# Altium schematic symbol library AS150UPW_2+4_M_G_Y.SchLib: 1 symbol
Pins are listed as number, name and electrical type; pins without a type are passive.

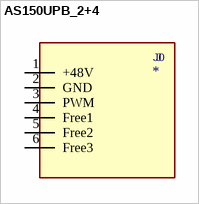
[diagram p0: symbol AS150UPB_2+4]

## AS150UPB_2+4
designator J0  Reference: J
footprint AS150UPB_2+4
pins: 1 +48V, 2 GND, 3 PWM, 4 Free1, 5 Free2, 6 Free3